# Altium schematic symbol library AS150UPB-M_2+4.SchLib: 1 symbol
Pins are listed as number, name and electrical type; pins without a type are passive.

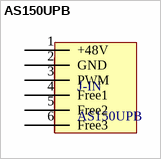
[diagram p0: symbol AS150UPB]

## AS150UPB
designator J-IN
footprint XT60_2_4
pins: 1 +48V, 2 GND, 3 PWM, 4 Free1, 5 Free2, 6 Free3